# Altium schematic symbol library MP2393GTL-Z.SchLib: 1 symbol
Pins are listed as number, name and electrical type; pins without a type are passive.

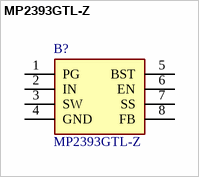
[diagram p0: symbol MP2393GTL-Z]

## MP2393GTL-Z
designator B?
Converter DC to DC Step-Down 4.2V to 24V 3A 8-Pin SOT-583 T/R; Manufacturer_Name: Monolithic Power Systems (MPS); Geometry.Height: 0.6mm; Manufacturer_Part_Number: MP2393GTL-Z; Mouser Part Number: 946-MP2393GTL-Z; Mouser Price/Stock: https://www.mouser.co.uk/ProductDetail/Monolithic-Power-Systems-MPS/MP2393GTL-Z?qs=YCa%2FAAYMW02wfKsqEy92eA%3D%3D; Arrow Part Number: *; Arrow Price/Stock: *; Datasheet Link: *
footprint SOTFL50P160X60-8N
pins: 1 PG, 2 IN, 3 SW, 4 GND, 5 BST, 6 EN, 7 SS, 8 FB